# Altium footprint library 1241162441.PcbLib: 1 footprints
Each footprint in its own frame and in the unit in brackets; x right, y up, seen from the top. Pads: shape width x height; smd on the part's side, far side on the other; paste and mask are expansions set on the pad; w line width, h text height; cw(c..) or ccw(c..) is an arc to the next point about the centre after c.
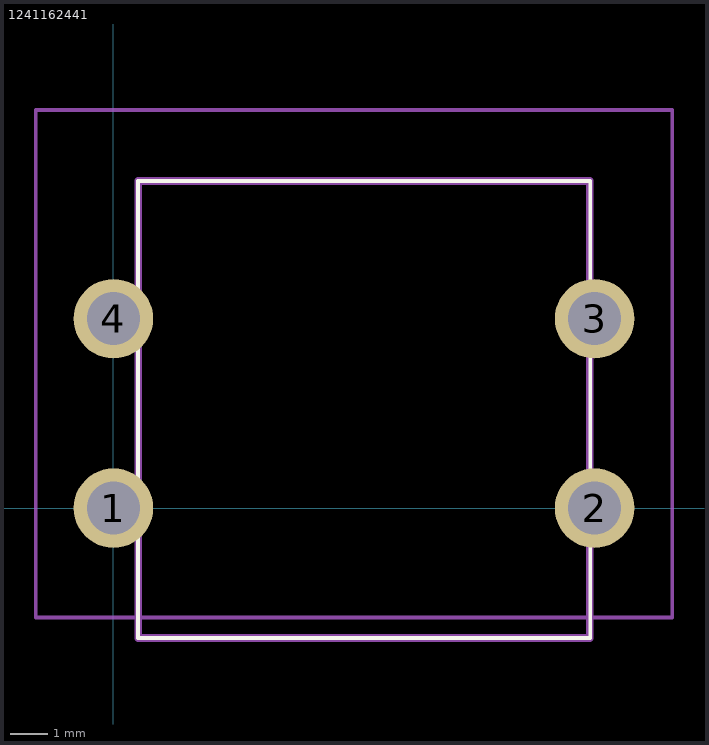
[diagram p0: the footprint, top view; thin cyan lines are the x and y axes]

## 1241162441 [mm]
pads (4):
  round 2.1 hole 1.4: 1(0,0) 2(12.7,0) 3(12.7,5) 4(0,5)
Top Overlay:
  lines w0.1: 0.65,-3.429 0.65,8.636 12.588,8.636 12.588,-3.429 0.65,-3.429
Mechanical 15:
  lines w0.2: 0.65,-3.429 0.65,8.636 12.573,8.636 12.573,-3.429 0.65,-3.429
Mechanical 20:
  lines w0.1: -2.05,-2.89 -2.05,10.51 14.75,10.51 14.75,-2.89 -2.05,-2.89